# Altium footprint library NRS8040T4R7NJGJ.PcbLib: 1 footprints
Each footprint in its own frame and in the unit in brackets; x right, y up, seen from the top. Pads: shape width x height; smd on the part's side, far side on the other; paste and mask are expansions set on the pad; w line width, h text height; cw(c..) or ccw(c..) is an arc to the next point about the centre after c.
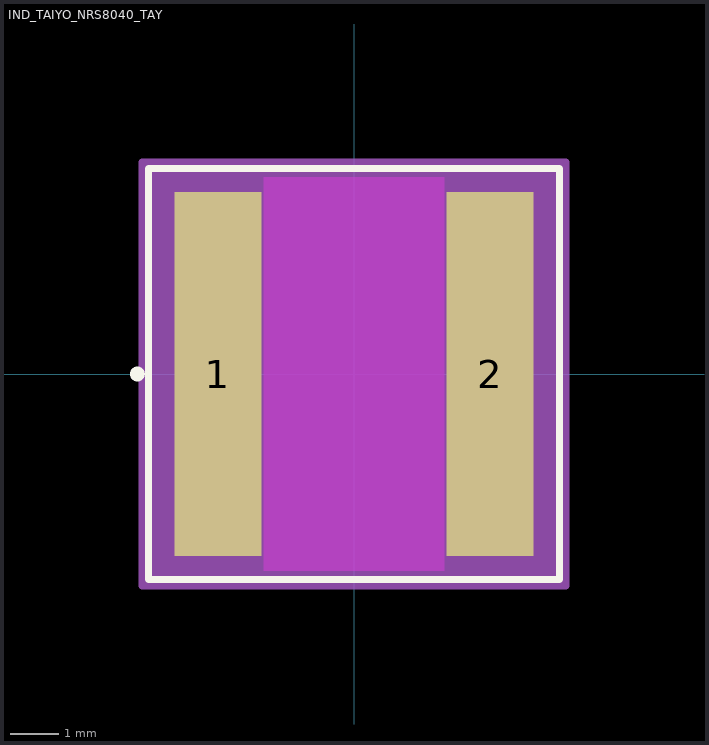
[diagram p0: the footprint, top view; thin cyan lines are the x and y axes]

## IND_TAIYO_NRS8040_TAY [mil]
pads (2):
  rect 70.5x295 smd paste+0 mask+0: 1(-110.25,0) 2(110.25,0)
Top Layer keep-out:
  region: -73,-159.5 -73,159.5 73,159.5 73,-159.5
Top Overlay:
  circle w6: c-175.5,0 r3
  lines w6: -166.5,-166.5 166.5,-166.5 166.5,166.5 -166.5,166.5 -166.5,-166.5
  text ".Designator" at -137.5,-25 h50
Mechanical 13:
  circle w1: c-158.5,0 r3
  lines w1: -161.5,-161.5 161.5,-161.5 161.5,161.5 -161.5,161.5 -161.5,-161.5
  text ".Designator" at -137.5,-25 h50
Mechanical 15:
  region: -171.5,-157.5 -171.5,157.5 -171.5,171.5 171.5,171.5 171.5,157.5 171.5,-157.5 171.5,-171.5 -171.5,-171.5
  lines w6: -171.5,-157.5 -171.5,157.5 ; -171.5,-157.5 -171.5,-157.5 ; -171.5,-157.5 -171.5,-171.5 171.5,-171.5 171.5,-157.5 ; -171.5,157.5 -171.5,157.5 ; -171.5,157.5 -171.5,171.5 171.5,171.5 171.5,157.5 ; 171.5,-157.5 171.5,157.5 ; 171.5,-157.5 171.5,-157.5 ; 171.5,157.5 171.5,157.5
3D body "IND_TAIYO_NRS8040_TAY.step": height 165, standoff 0, extent -161.5,-161.61 161.5,161.61